# Altium footprint library Components.PcbLib: 82 footprints (part 3 of 6)
Each footprint in its own frame and in the unit in brackets; x right, y up, seen from the top. Pads: shape width x height; smd on the part's side, far side on the other; paste and mask are expansions set on the pad; w line width, h text height; cw(c..) or ccw(c..) is an arc to the next point about the centre after c.
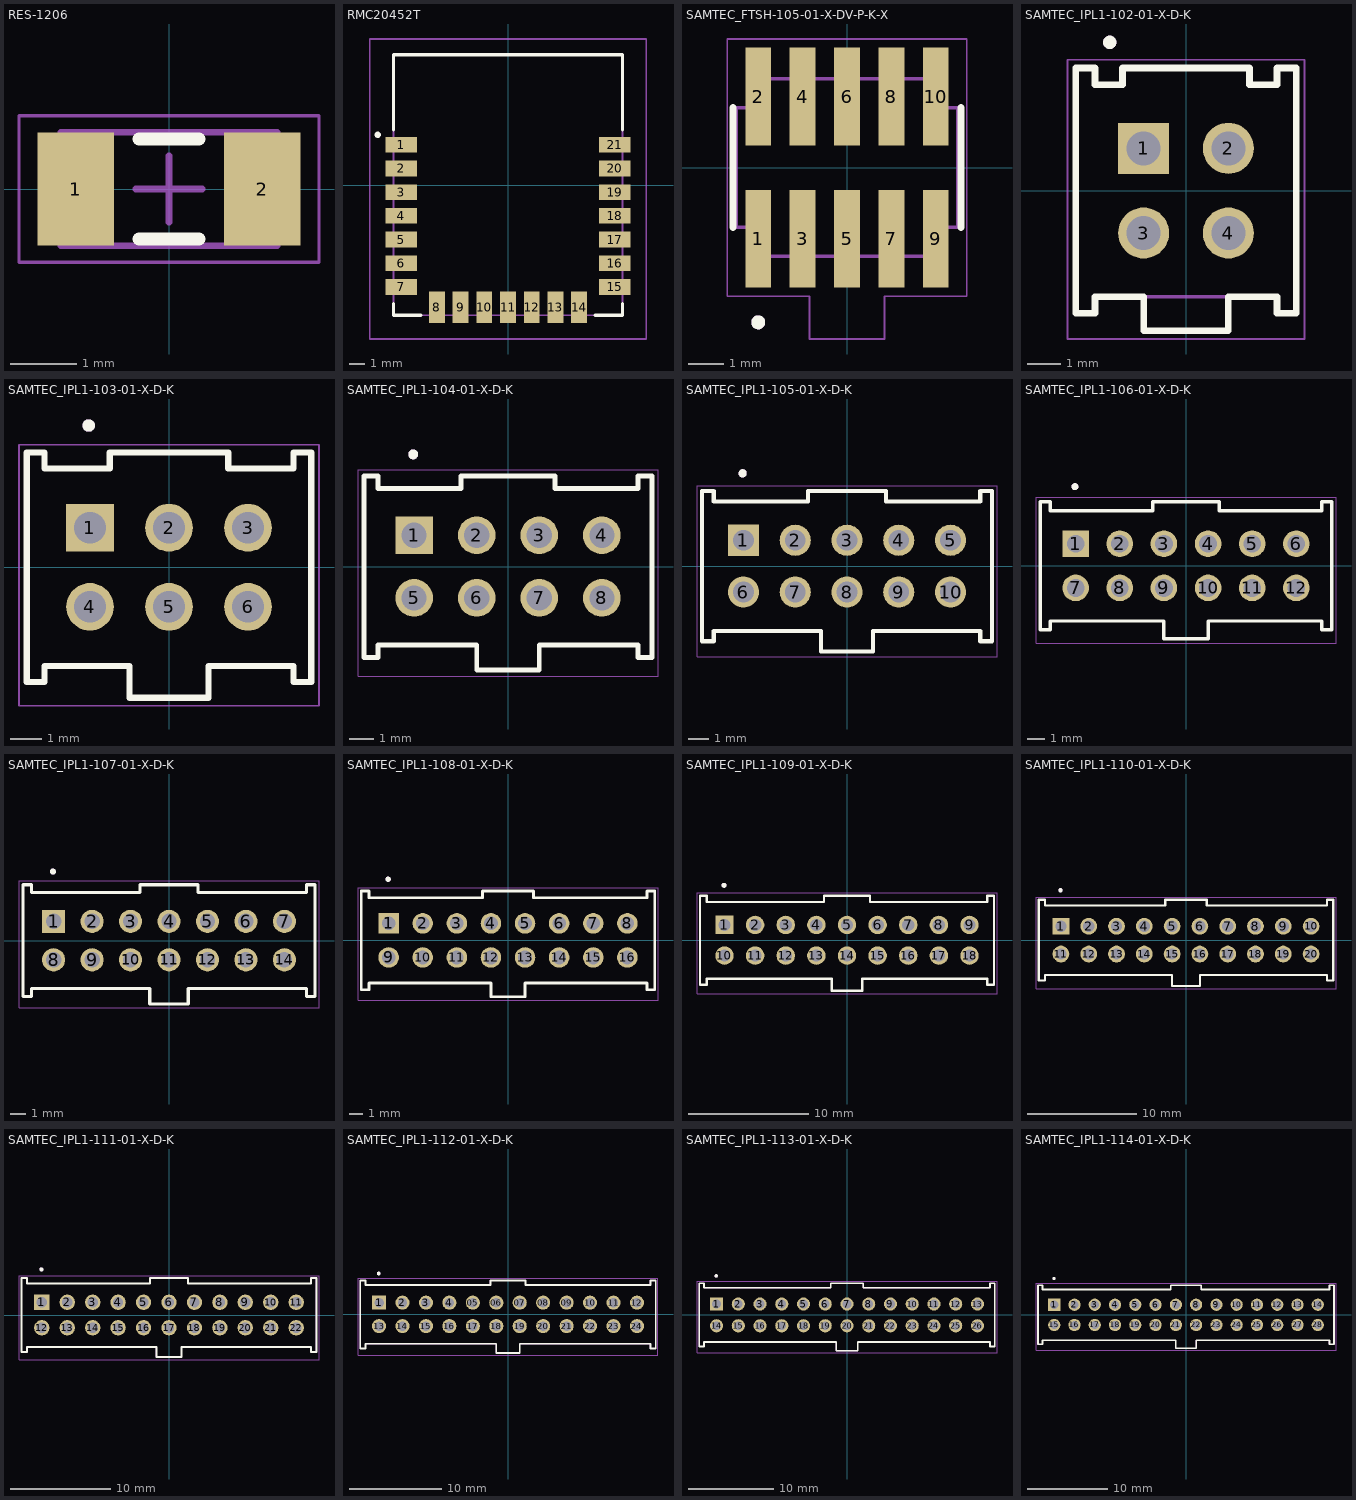
[diagram p2: the footprints below, top view; thin cyan lines are the x and y axes]

## RES-1206 [mm] "Chip Resistor, 2-Leads, Body 3.10x1.58mm, IPC Medium Density"
height 0.65
pads (2):
  rect 1.15x1.7 smd: 1(-1.4,0) 2(1.4,0)
Top Overlay:
  lines w0.2: -0.45,-0.75 0.45,-0.75 ; -0.45,0.75 0.45,0.75
Mechanical 13:
  lines w0.1: -1.625,-0.85 1.625,-0.85 1.625,0.85 -1.625,0.85 -1.625,-0.85
Mechanical 15:
  lines w0.05: -2.25,-1.1 2.25,-1.1 2.25,1.1 -2.25,1.1 -2.25,-1.1
  lines w0.1: -0.5,0 0.5,0 ; 0,-0.5 0,0.5
3D body: height 0.65, standoff 0, extent 1.175,-0.85 1.625,0.85
3D body: height 0.65, standoff 0, extent -1.625,-0.85 -1.175,0.85
3D body: height 0.65, standoff 0, extent -1.175,-0.85 1.175,0.85

## RMC20452T [mm]
pads (21):
  rect 2x1 smd: 1(-6.75,2.55) 2(-6.75,1.05) 3(-6.75,-0.45) 4(-6.75,-1.95) 5(-6.75,-3.45) 6(-6.75,-4.95) 7(-6.75,-6.45) 15(6.75,-6.45) 16(6.75,-4.95) 17(6.75,-3.45) 18(6.75,-1.95) 19(6.75,-0.45) 20(6.75,1.05) 21(6.75,2.55)
  rect 1x2 smd: 8(-4.5,-7.75) 9(-3,-7.75) 10(-1.5,-7.75) 11(0,-7.75) 12(1.5,-7.75) 13(3,-7.75) 14(4.5,-7.75)
Top Overlay:
  lines w0.2: -7.25,-7.5 -7.25,-8.25 -5.5,-8.25 ; -7.25,3.5 -7.25,8.25 7.25,8.25 7.25,3.5 ; 5.5,-8.25 7.25,-8.25 7.25,-7.5
  lines w0.203: -8.352,3.185 cw(c-8.25,3.185) -8.148,3.185 cw(c-8.25,3.185) -8.352,3.185
Mechanical 13:
  lines w0.1: -7.25,-8.25 7.25,-8.25 7.25,8.25 -7.25,8.25 -7.25,-8.25
Mechanical 15:
  lines w0.1: -8.75,-9.75 8.75,-9.75 8.75,9.25 -8.75,9.25 -8.75,-9.75
3D body "RMC20452T.stp": height 2.65, standoff 0, extent -7.25,-8.25 7.25,8.25

## SAMTEC_FTSH-105-01-X-DV-P-K-X [mil]
pads (10):
  rect 29x110 smd paste+0 mask+4.02: 1(-100,-80) 2(-100,80) 3(-50,-80) 4(-50,80) 5(0,-80) 6(0,80) 7(50,-80) 8(50,80) 9(100,-80) 10(100,80)
Top Overlay:
  circle w7.87: c-100,-174.37 r3.94
  lines w7.87: -128.15,-67.5 -128.15,67.5 ; 128.15,-67.5 128.15,67.5
Mechanical 13:
  circle w7.87: c-100,-174.37 r3.94
  lines w3.94: -125,-67.5 -100,-67.5 -100,-100 100,-100 100,-67.5 125,-67.5 125,67.5 100,67.5 100,100 -100,100 -100,67.5 -125,67.5 -125,-67.5
Mechanical 15:
  lines w1.97: -134.84,-144.84 -134.84,144.84 134.84,144.84 134.84,-144.84 42.34,-144.84 42.34,-193.11 -42.34,-193.11 -42.34,-144.84 -134.84,-144.84
3D body "FTSH-105-01-F-DV-K.stp": height 242, standoff 1, extent -125,-115 125,115

## SAMTEC_IPL1-102-01-X-D-K [mm]
pads (4):
  rect 1.53x1.53 hole 1.02: 1(-1.27,1.27)
  round 1.53 hole 1.02: 2(1.27,1.27) 3(-1.27,-1.27) 4(1.27,-1.27)
Top Overlay:
  circle w0.2: c-2.286,4.445 r0.1
  lines w0.2: -3.3,-3.675 -3.3,3.675 -2.729,3.675 -2.729,3.175 -1.905,3.175 -1.905,3.675 1.905,3.675 1.905,3.175 2.729,3.175 2.729,3.675 3.3,3.675 3.3,-3.675 2.729,-3.675 2.729,-3.175 1.27,-3.175 1.27,-4.195 -1.27,-4.195 -1.27,-3.175 -2.729,-3.175 -2.729,-3.675 -3.3,-3.675
Mechanical 13:
  circle w0.2: c-2.286,4.445 r0.1
  lines w0.1: -1.27,-3.175 -2.729,-3.175 -2.729,-3.675 -3.3,-3.675 -3.3,3.675 -2.729,3.675 -2.729,3.175 -1.905,3.175 -1.905,3.675 1.905,3.675 1.905,3.175 2.729,3.175 2.729,3.675 3.3,3.675 3.3,-3.675 2.729,-3.675 2.729,-3.175 1.27,-3.175 ; -1.27,-3.175 -1.27,-4.195 1.27,-4.195 1.27,-3.175 ; -1.27,-3.175 1.27,-3.175
Mechanical 15:
  lines w0.05: -3.55,-4.445 3.55,-4.445 3.55,3.925 -3.55,3.925 -3.55,-4.445
3D body "IPL1-102-01-L-D-K.stp": height 8.13, standoff -3.05, extent -3.302,-4.191 3.302,3.683

## SAMTEC_IPL1-103-01-X-D-K [mm]
pads (6):
  rect 1.53x1.53 hole 1.02: 1(-2.54,1.27)
  round 1.53 hole 1.02: 2(0,1.27) 3(2.54,1.27) 4(-2.54,-1.27) 5(0,-1.27) 6(2.54,-1.27)
Top Overlay:
  circle w0.2: c-2.58,4.555 r0.1
  lines w0.2: -4.57,-3.685 -4,-3.685 -4,-3.175 -1.27,-3.175 -1.27,-4.195 1.27,-4.195 1.27,-3.175 4,-3.175 4,-3.685 4.57,-3.685 4.57,3.685 4,3.685 4,3.175 1.905,3.175 1.905,3.685 -1.905,3.685 -1.905,3.175 -4,3.175 -4,3.685 -4.57,3.685 -4.57,-3.685
Mechanical 13:
  circle w0.2: c-2.58,4.555 r0.1
  lines w0.1: -4.57,-3.685 -4,-3.685 -4,-3.175 -1.27,-3.175 -1.27,-4.195 1.27,-4.195 1.27,-3.175 4,-3.175 4,-3.685 4.57,-3.685 4.57,3.685 4,3.685 4,3.175 1.905,3.175 1.905,3.685 -1.905,3.685 -1.905,3.175 -4,3.175 -4,3.685 -4.57,3.685 -4.57,-3.685
Mechanical 15:
  lines w0.05: -4.82,-4.445 4.82,-4.445 4.82,3.935 -4.82,3.935 -4.82,-4.445
3D body "IPL1-103-01-L-D-K.stp": height 8.13, standoff -3.05, extent -4.572,-4.191 4.572,3.683

## SAMTEC_IPL1-104-01-X-D-K [mm] "Samtec IPL1-104-01-X-D-K, Mini Mate 2.54 mm double row vertical TH shrouded header, keyed"
pads (8):
  rect 1.53x1.53 hole 1.02: 1(-3.81,1.27)
  round 1.53 hole 1.02: 2(-1.27,1.27) 3(1.27,1.27) 4(3.81,1.27) 5(-3.81,-1.27) 6(-1.27,-1.27) 7(1.27,-1.27) 8(3.81,-1.27)
Top Overlay:
  circle w0.2: c-3.85,4.555 r0.1
  lines w0.2: -5.84,-3.685 -5.27,-3.685 -5.27,-3.175 -1.27,-3.175 -1.27,-4.195 1.27,-4.195 1.27,-3.175 5.27,-3.175 5.27,-3.685 5.84,-3.685 5.84,3.685 5.27,3.685 5.27,3.175 1.905,3.175 1.905,3.685 -1.905,3.685 -1.905,3.175 -5.27,3.175 -5.27,3.685 -5.84,3.685 -5.84,-3.685
Mechanical 13:
  circle w0.2: c-3.85,4.555 r0.1
  lines w0.1: -5.84,-3.685 -5.27,-3.685 -5.27,-3.175 -1.27,-3.175 -1.27,-4.195 1.27,-4.195 1.27,-3.175 5.27,-3.175 5.27,-3.685 5.84,-3.685 5.84,3.685 5.27,3.685 5.27,3.175 1.905,3.175 1.905,3.685 -1.905,3.685 -1.905,3.175 -5.27,3.175 -5.27,3.685 -5.84,3.685 -5.84,-3.685
Mechanical 15:
  lines w0.05: -6.09,-4.445 6.09,-4.445 6.09,3.935 -6.09,3.935 -6.09,-4.445
3D body "IPL1-104-01-L-D-K.stp": height 8.13, standoff -3.05, extent -5.842,-4.191 5.842,3.683

## SAMTEC_IPL1-105-01-X-D-K [mm] "Samtec IPL1-105-01-X-D-K, Mini Mate 2.54 mm double row vertical TH shrouded header, keyed"
pads (10):
  rect 1.53x1.53 hole 1.02: 1(-5.08,1.27)
  round 1.53 hole 1.02: 2(-2.54,1.27) 3(0,1.27) 4(2.54,1.27) 5(5.08,1.27) 6(-5.08,-1.27) 7(-2.54,-1.27) 8(0,-1.27) 9(2.54,-1.27) 10(5.08,-1.27)
Top Overlay:
  circle w0.2: c-5.12,4.555 r0.1
  lines w0.2: -7.11,-3.685 -7.11,3.685 -6.54,3.685 -6.54,3.175 -1.905,3.175 -1.905,3.685 1.905,3.685 1.905,3.175 6.54,3.175 6.54,3.685 7.11,3.685 7.11,-3.685 6.54,-3.685 6.54,-3.175 1.27,-3.175 1.27,-4.195 -1.27,-4.195 -1.27,-3.175 -6.54,-3.175 -6.54,-3.685 -7.11,-3.685
Mechanical 13:
  circle w0.2: c-5.12,4.555 r0.1
  lines w0.1: -7.11,-3.685 -7.11,3.685 -6.54,3.685 -6.54,3.175 -1.905,3.175 -1.905,3.685 1.905,3.685 1.905,3.175 6.54,3.175 6.54,3.685 7.11,3.685 7.11,-3.685 6.54,-3.685 6.54,-3.175 1.27,-3.175 1.27,-4.195 -1.27,-4.195 -1.27,-3.175 -6.54,-3.175 -6.54,-3.685 -7.11,-3.685
Mechanical 15:
  lines w0.05: -7.36,-4.445 -7.36,3.935 7.36,3.935 7.36,-4.445 -7.36,-4.445
3D body "IPL1-105-01-L-D-K.stp": height 8.13, standoff -3.05, extent -7.112,-4.191 7.112,3.683

## SAMTEC_IPL1-106-01-X-D-K [mm] "Samtec IPL1-106-01-X-D-K, Mini Mate 2.54 mm double row vertical TH shrouded header, keyed"
pads (12):
  rect 1.53x1.53 hole 1.02: 1(-6.35,1.27)
  round 1.53 hole 1.02: 2(-3.81,1.27) 3(-1.27,1.27) 4(1.27,1.27) 5(3.81,1.27) 6(6.35,1.27) 7(-6.35,-1.27) 8(-3.81,-1.27) 9(-1.27,-1.27) 10(1.27,-1.27) 11(3.81,-1.27) 12(6.35,-1.27)
Top Overlay:
  circle w0.2: c-6.39,4.555 r0.1
  lines w0.2: -8.38,-3.685 -8.38,3.685 -7.81,3.685 -7.81,3.175 -1.905,3.175 -1.905,3.685 1.905,3.685 1.905,3.175 7.81,3.175 7.81,3.685 8.38,3.685 8.38,-3.685 7.81,-3.685 7.81,-3.175 1.27,-3.175 1.27,-4.195 -1.27,-4.195 -1.27,-3.175 -7.81,-3.175 -7.81,-3.685 -8.38,-3.685
Mechanical 13:
  circle w0.2: c-6.39,4.555 r0.1
  lines w0.1: -8.38,-3.685 -8.38,3.685 -7.81,3.685 -7.81,3.175 -1.905,3.175 -1.905,3.685 1.905,3.685 1.905,3.175 7.81,3.175 7.81,3.685 8.38,3.685 8.38,-3.685 7.81,-3.685 7.81,-3.175 1.27,-3.175 1.27,-4.195 -1.27,-4.195 -1.27,-3.175 -7.81,-3.175 -7.81,-3.685 -8.38,-3.685
Mechanical 15:
  lines w0.05: -8.63,-4.445 -8.63,3.935 8.63,3.935 8.63,-4.445 -8.63,-4.445
3D body "IPL1-106-01-L-D-K.stp": height 8.13, standoff -3.05, extent -8.382,-4.191 8.382,3.683

## SAMTEC_IPL1-107-01-X-D-K [mm] "Samtec IPL1-107-01-X-D-K, Mini Mate 2.54 mm double row vertical TH shrouded header, keyed"
pads (14):
  rect 1.53x1.53 hole 1.02: 1(-7.62,1.27)
  round 1.53 hole 1.02: 2(-5.08,1.27) 3(-2.54,1.27) 4(0,1.27) 5(2.54,1.27) 6(5.08,1.27) 7(7.62,1.27) 8(-7.62,-1.27) 9(-5.08,-1.27) 10(-2.54,-1.27) 11(0,-1.27) 12(2.54,-1.27) 13(5.08,-1.27) 14(7.62,-1.27)
Top Overlay:
  circle w0.2: c-7.66,4.555 r0.1
  lines w0.2: -9.65,-3.685 -9.65,3.685 -9.08,3.685 -9.08,3.175 -1.905,3.175 -1.905,3.685 1.905,3.685 1.905,3.175 9.08,3.175 9.08,3.685 9.65,3.685 9.65,-3.685 9.08,-3.685 9.08,-3.175 1.27,-3.175 1.27,-4.195 -1.27,-4.195 -1.27,-3.175 -9.08,-3.175 -9.08,-3.685 -9.65,-3.685
Mechanical 13:
  circle w0.2: c-7.66,4.555 r0.1
  lines w0.1: -9.65,-3.685 -9.65,3.685 -9.08,3.685 -9.08,3.175 -1.905,3.175 -1.905,3.685 1.905,3.685 1.905,3.175 9.08,3.175 9.08,3.685 9.65,3.685 9.65,-3.685 9.08,-3.685 9.08,-3.175 1.27,-3.175 1.27,-4.195 -1.27,-4.195 -1.27,-3.175 -9.08,-3.175 -9.08,-3.685 -9.65,-3.685
Mechanical 15:
  lines w0.05: -9.9,-4.445 -9.9,3.935 9.9,3.935 9.9,-4.445 -9.9,-4.445
3D body "IPL1-107-01-L-D-K.stp": height 8.13, standoff -3.05, extent -9.652,-4.191 9.652,3.683

## SAMTEC_IPL1-108-01-X-D-K [mm] "Samtec IPL1-108-01-X-D-K, Mini Mate 2.54 mm double row vertical TH shrouded header, keyed"
pads (16):
  rect 1.53x1.53 hole 1.02: 1(-8.89,1.27)
  round 1.53 hole 1.02: 2(-6.35,1.27) 3(-3.81,1.27) 4(-1.27,1.27) 5(1.27,1.27) 6(3.81,1.27) 7(6.35,1.27) 8(8.89,1.27) 9(-8.89,-1.27) 10(-6.35,-1.27) 11(-3.81,-1.27) 12(-1.27,-1.27) 13(1.27,-1.27) 14(3.81,-1.27) 15(6.35,-1.27) 16(8.89,-1.27)
Top Overlay:
  circle w0.2: c-8.93,4.555 r0.1
  lines w0.2: -10.92,-3.685 -10.92,3.685 -10.35,3.685 -10.35,3.175 -1.905,3.175 -1.905,3.685 1.905,3.685 1.905,3.175 10.35,3.175 10.35,3.685 10.92,3.685 10.92,-3.685 10.35,-3.685 10.35,-3.175 1.27,-3.175 1.27,-4.195 -1.27,-4.195 -1.27,-3.175 -10.35,-3.175 -10.35,-3.685 -10.92,-3.685
Mechanical 13:
  circle w0.2: c-8.93,4.555 r0.1
  lines w0.1: -10.92,-3.685 -10.92,3.685 -10.35,3.685 -10.35,3.175 -1.905,3.175 -1.905,3.685 1.905,3.685 1.905,3.175 10.35,3.175 10.35,3.685 10.92,3.685 10.92,-3.685 10.35,-3.685 10.35,-3.175 1.27,-3.175 1.27,-4.195 -1.27,-4.195 -1.27,-3.175 -10.35,-3.175 -10.35,-3.685 -10.92,-3.685
Mechanical 15:
  lines w0.05: -11.17,-4.445 -11.17,3.935 11.17,3.935 11.17,-4.445 -11.17,-4.445
3D body "IPL1-108-01-L-D-K.stp": height 8.13, standoff -3.05, extent -10.922,-4.191 10.922,3.683

## SAMTEC_IPL1-109-01-X-D-K [mm] "Samtec IPL1-109-01-X-D-K, Mini Mate 2.54 mm double row vertical TH shrouded header, keyed"
pads (18):
  rect 1.53x1.53 hole 1.02: 1(-10.16,1.27)
  round 1.53 hole 1.02: 2(-7.62,1.27) 3(-5.08,1.27) 4(-2.54,1.27) 5(0,1.27) 6(2.54,1.27) 7(5.08,1.27) 8(7.62,1.27) 9(10.16,1.27) 10(-10.16,-1.27) 11(-7.62,-1.27) 12(-5.08,-1.27) 13(-2.54,-1.27) 14(0,-1.27) 15(2.54,-1.27) 16(5.08,-1.27) 17(7.62,-1.27) 18(10.16,-1.27)
Top Overlay:
  circle w0.2: c-10.2,4.555 r0.1
  lines w0.2: -12.19,-3.685 -11.62,-3.685 -11.62,-3.175 -1.27,-3.175 -1.27,-4.195 1.27,-4.195 1.27,-3.175 11.62,-3.175 11.62,-3.685 12.19,-3.685 12.19,3.685 11.62,3.685 11.62,3.175 1.905,3.175 1.905,3.685 -1.905,3.685 -1.905,3.175 -11.62,3.175 -11.62,3.685 -12.19,3.685 -12.19,-3.685
Mechanical 13:
  circle w0.2: c-10.2,4.555 r0.1
  lines w0.1: -12.19,-3.685 -11.62,-3.685 -11.62,-3.175 -1.27,-3.175 -1.27,-4.195 1.27,-4.195 1.27,-3.175 11.62,-3.175 11.62,-3.685 12.19,-3.685 12.19,3.685 11.62,3.685 11.62,3.175 1.905,3.175 1.905,3.685 -1.905,3.685 -1.905,3.175 -11.62,3.175 -11.62,3.685 -12.19,3.685 -12.19,-3.685
Mechanical 15:
  lines w0.05: -12.44,-4.445 12.44,-4.445 12.44,3.935 -12.44,3.935 -12.44,-4.445
3D body "IPL1-109-01-L-D-K.stp": height 8.13, standoff -3.05, extent -12.192,-4.191 12.192,3.683

## SAMTEC_IPL1-110-01-X-D-K [mm] "Samtec IPL1-110-01-X-D-K, Mini Mate 2.54 mm double row vertical TH shrouded header, keyed"
pads (20):
  rect 1.53x1.53 hole 1.02: 1(-11.43,1.27)
  round 1.53 hole 1.02: 2(-8.89,1.27) 3(-6.35,1.27) 4(-3.81,1.27) 5(-1.27,1.27) 6(1.27,1.27) 7(3.81,1.27) 8(6.35,1.27) 9(8.89,1.27) 10(11.43,1.27) 11(-11.43,-1.27) 12(-8.89,-1.27) 13(-6.35,-1.27) 14(-3.81,-1.27) 15(-1.27,-1.27) 16(1.27,-1.27) 17(3.81,-1.27) 18(6.35,-1.27) 19(8.89,-1.27) 20(11.43,-1.27)
Top Overlay:
  circle w0.2: c-11.47,4.555 r0.1
  lines w0.2: -13.46,-3.685 -13.46,3.685 -12.89,3.685 -12.89,3.175 -1.905,3.175 -1.905,3.685 1.905,3.685 1.905,3.175 12.89,3.175 12.89,3.685 13.46,3.685 13.46,-3.685 12.89,-3.685 12.89,-3.175 1.27,-3.175 1.27,-4.195 -1.27,-4.195 -1.27,-3.175 -12.89,-3.175 -12.89,-3.685 -13.46,-3.685
Mechanical 13:
  circle w0.2: c-11.47,4.555 r0.1
  lines w0.1: -13.46,-3.685 -13.46,3.685 -12.89,3.685 -12.89,3.175 -1.905,3.175 -1.905,3.685 1.905,3.685 1.905,3.175 12.89,3.175 12.89,3.685 13.46,3.685 13.46,-3.685 12.89,-3.685 12.89,-3.175 1.27,-3.175 1.27,-4.195 -1.27,-4.195 -1.27,-3.175 -12.89,-3.175 -12.89,-3.685 -13.46,-3.685
Mechanical 15:
  lines w0.05: -13.71,-4.445 -13.71,3.935 13.71,3.935 13.71,-4.445 -13.71,-4.445
3D body "IPL1-110-01-L-D-K.stp": height 8.13, standoff -3.05, extent -13.462,-4.191 13.462,3.683

## SAMTEC_IPL1-111-01-X-D-K [mm] "Samtec IPL1-111-01-X-D-K, Mini Mate 2.54 mm double row vertical TH shrouded header, keyed"
pads (22):
  rect 1.53x1.53 hole 1.02: 1(-12.7,1.27)
  round 1.53 hole 1.02: 2(-10.16,1.27) 3(-7.62,1.27) 4(-5.08,1.27) 5(-2.54,1.27) 6(0,1.27) 7(2.54,1.27) 8(5.08,1.27) 9(7.62,1.27) 10(10.16,1.27) 11(12.7,1.27) 12(-12.7,-1.27) 13(-10.16,-1.27) 14(-7.62,-1.27) 15(-5.08,-1.27) 16(-2.54,-1.27) 17(0,-1.27) 18(2.54,-1.27) 19(5.08,-1.27) 20(7.62,-1.27) 21(10.16,-1.27) 22(12.7,-1.27)
Top Overlay:
  circle w0.2: c-12.74,4.555 r0.1
  lines w0.2: -14.73,-3.685 -14.73,3.685 -14.16,3.685 -14.16,3.175 -1.905,3.175 -1.905,3.685 1.905,3.685 1.905,3.175 14.16,3.175 14.16,3.685 14.73,3.685 14.73,-3.685 14.16,-3.685 14.16,-3.175 1.27,-3.175 1.27,-4.195 -1.27,-4.195 -1.27,-3.175 -14.16,-3.175 -14.16,-3.685 -14.73,-3.685
Mechanical 13:
  circle w0.2: c-12.74,4.555 r0.1
  lines w0.1: -14.73,-3.685 -14.73,3.685 -14.16,3.685 -14.16,3.175 -1.905,3.175 -1.905,3.685 1.905,3.685 1.905,3.175 14.16,3.175 14.16,3.685 14.73,3.685 14.73,-3.685 14.16,-3.685 14.16,-3.175 1.27,-3.175 1.27,-4.195 -1.27,-4.195 -1.27,-3.175 -14.16,-3.175 -14.16,-3.685 -14.73,-3.685
Mechanical 15:
  lines w0.05: -14.98,-4.445 -14.98,3.935 14.98,3.935 14.98,-4.445 -14.98,-4.445
3D body "IPL1-111-01-L-D-K.stp": height 8.13, standoff -3.05, extent -14.732,-4.191 14.732,3.683

## SAMTEC_IPL1-112-01-X-D-K [mm]
height 8.13
pads (24):
  rect 1.53x1.53 / inner round 1.53 / far side rect 1.53x1.53 hole 1.02: 1(-13.97,1.27)
  round 1.53 hole 1.02: 2(-11.43,1.27) 3(-8.89,1.27) 4(-6.35,1.27) 05(-3.81,1.27) 06(-1.27,1.27) 07(1.27,1.27) 08(3.81,1.27) 09(6.35,1.27) 10(8.89,1.27) 11(11.43,1.27) 12(13.97,1.27) 13(-13.97,-1.27) 14(-11.43,-1.27) 15(-8.89,-1.27) 16(-6.35,-1.27) 17(-3.81,-1.27) 18(-1.27,-1.27) 19(1.27,-1.27) 20(3.81,-1.27) 21(6.35,-1.27) 22(8.89,-1.27) 23(11.43,-1.27) 24(13.97,-1.27)
Top Overlay:
  circle w0.2: c-14.01,4.428 r0.1
  lines w0.2: -16,-3.685 -15.43,-3.685 -15.43,-3.175 -1.27,-3.175 -1.27,-4.195 1.27,-4.195 1.27,-3.175 15.43,-3.175 15.43,-3.685 16,-3.685 16,3.685 15.43,3.685 15.43,3.175 1.905,3.175 1.905,3.685 -1.905,3.685 -1.905,3.175 -15.43,3.175 -15.43,3.685 -16,3.685 -16,-3.685
Mechanical 13:
  circle w0.2: c-14.01,4.428 r0.1
  lines w0.1: -16,-3.685 -15.43,-3.685 -15.43,-3.175 -1.27,-3.175 -1.27,-4.195 1.27,-4.195 1.27,-3.175 15.43,-3.175 15.43,-3.685 16,-3.685 16,3.685 15.43,3.685 15.43,3.175 1.905,3.175 1.905,3.685 -1.905,3.685 -1.905,3.175 -15.43,3.175 -15.43,3.685 -16,3.685 -16,-3.685
Mechanical 15:
  lines w0.05: -16.25,-4.445 16.25,-4.445 16.25,3.935 -16.25,3.935 -16.25,-4.445
3D body "IPL1-112-01-L-D-K.stp": height 8.13, standoff -3.05, extent -16.002,-4.191 16.002,3.683

## SAMTEC_IPL1-113-01-X-D-K [mm] "Samtec IPL1-113-01-X-D-K, Mini Mate 2.54 mm double row vertical TH shrouded header, keyed"
pads (26):
  rect 1.53x1.53 hole 1.02: 1(-15.24,1.27)
  round 1.53 hole 1.02: 2(-12.7,1.27) 3(-10.16,1.27) 4(-7.62,1.27) 5(-5.08,1.27) 6(-2.54,1.27) 7(0,1.27) 8(2.54,1.27) 9(5.08,1.27) 10(7.62,1.27) 11(10.16,1.27) 12(12.7,1.27) 13(15.24,1.27) 14(-15.24,-1.27) 15(-12.7,-1.27) 16(-10.16,-1.27) 17(-7.62,-1.27) 18(-5.08,-1.27) 19(-2.54,-1.27) 20(0,-1.27) 21(2.54,-1.27) 22(5.08,-1.27) 23(7.62,-1.27) 24(10.16,-1.27) 25(12.7,-1.27) 26(15.24,-1.27)
Top Overlay:
  circle w0.2: c-15.28,4.555 r0.1
  lines w0.2: -17.27,-3.685 -17.27,3.685 -16.7,3.685 -16.7,3.175 -1.905,3.175 -1.905,3.685 1.905,3.685 1.905,3.175 16.7,3.175 16.7,3.685 17.27,3.685 17.27,-3.685 16.7,-3.685 16.7,-3.175 1.27,-3.175 1.27,-4.195 -1.27,-4.195 -1.27,-3.175 -16.7,-3.175 -16.7,-3.685 -17.27,-3.685
Mechanical 13:
  circle w0.2: c-15.28,4.555 r0.1
  lines w0.1: -17.27,-3.685 -17.27,3.685 -16.7,3.685 -16.7,3.175 -1.905,3.175 -1.905,3.685 1.905,3.685 1.905,3.175 16.7,3.175 16.7,3.685 17.27,3.685 17.27,-3.685 16.7,-3.685 16.7,-3.175 1.27,-3.175 1.27,-4.195 -1.27,-4.195 -1.27,-3.175 -16.7,-3.175 -16.7,-3.685 -17.27,-3.685
Mechanical 15:
  lines w0.05: -17.52,-4.445 -17.52,3.935 17.52,3.935 17.52,-4.445 -17.52,-4.445
3D body "IPL1-113-01-L-D-K.stp": height 8.13, standoff -3.05, extent -17.272,-4.191 17.272,3.683

## SAMTEC_IPL1-114-01-X-D-K [mm] "Samtec IPL1-114-01-X-D-K, Mini Mate 2.54 mm double row vertical TH shrouded header, keyed"
pads (28):
  rect 1.53x1.53 hole 1.02: 1(-16.51,1.27)
  round 1.53 hole 1.02: 2(-13.97,1.27) 3(-11.43,1.27) 4(-8.89,1.27) 5(-6.35,1.27) 6(-3.81,1.27) 7(-1.27,1.27) 8(1.27,1.27) 9(3.81,1.27) 10(6.35,1.27) 11(8.89,1.27) 12(11.43,1.27) 13(13.97,1.27) 14(16.51,1.27) 15(-16.51,-1.27) 16(-13.97,-1.27) 17(-11.43,-1.27) 18(-8.89,-1.27) 19(-6.35,-1.27) 20(-3.81,-1.27) 21(-1.27,-1.27) 22(1.27,-1.27) 23(3.81,-1.27) 24(6.35,-1.27) 25(8.89,-1.27) 26(11.43,-1.27) 27(13.97,-1.27) 28(16.51,-1.27)
Top Overlay:
  circle w0.2: c-16.55,4.555 r0.1
  lines w0.2: -18.54,-3.685 -18.54,3.685 -17.97,3.685 -17.97,3.175 -1.905,3.175 -1.905,3.685 1.905,3.685 1.905,3.175 17.97,3.175 17.97,3.685 18.54,3.685 18.54,-3.685 17.97,-3.685 17.97,-3.175 1.27,-3.175 1.27,-4.195 -1.27,-4.195 -1.27,-3.175 -17.97,-3.175 -17.97,-3.685 -18.54,-3.685
Mechanical 13:
  circle w0.2: c-16.55,4.555 r0.1
  lines w0.1: -18.54,-3.685 -18.54,3.685 -17.97,3.685 -17.97,3.175 -1.905,3.175 -1.905,3.685 1.905,3.685 1.905,3.175 17.97,3.175 17.97,3.685 18.54,3.685 18.54,-3.685 17.97,-3.685 17.97,-3.175 1.27,-3.175 1.27,-4.195 -1.27,-4.195 -1.27,-3.175 -17.97,-3.175 -17.97,-3.685 -18.54,-3.685
Mechanical 15:
  lines w0.05: -18.79,-4.445 -18.79,3.935 18.79,3.935 18.79,-4.445 -18.79,-4.445
3D body "IPL1-114-01-L-D-K.stp": height 8.13, standoff -3.05, extent -18.542,-4.191 18.542,3.683